# Altium footprint library FTP.PcbLib: 207 footprints (part 11 of 13)
Each footprint in its own frame and in the unit in brackets; x right, y up, seen from the top. Pads: shape width x height; smd on the part's side, far side on the other; paste and mask are expansions set on the pad; w line width, h text height; cw(c..) or ccw(c..) is an arc to the next point about the centre after c.
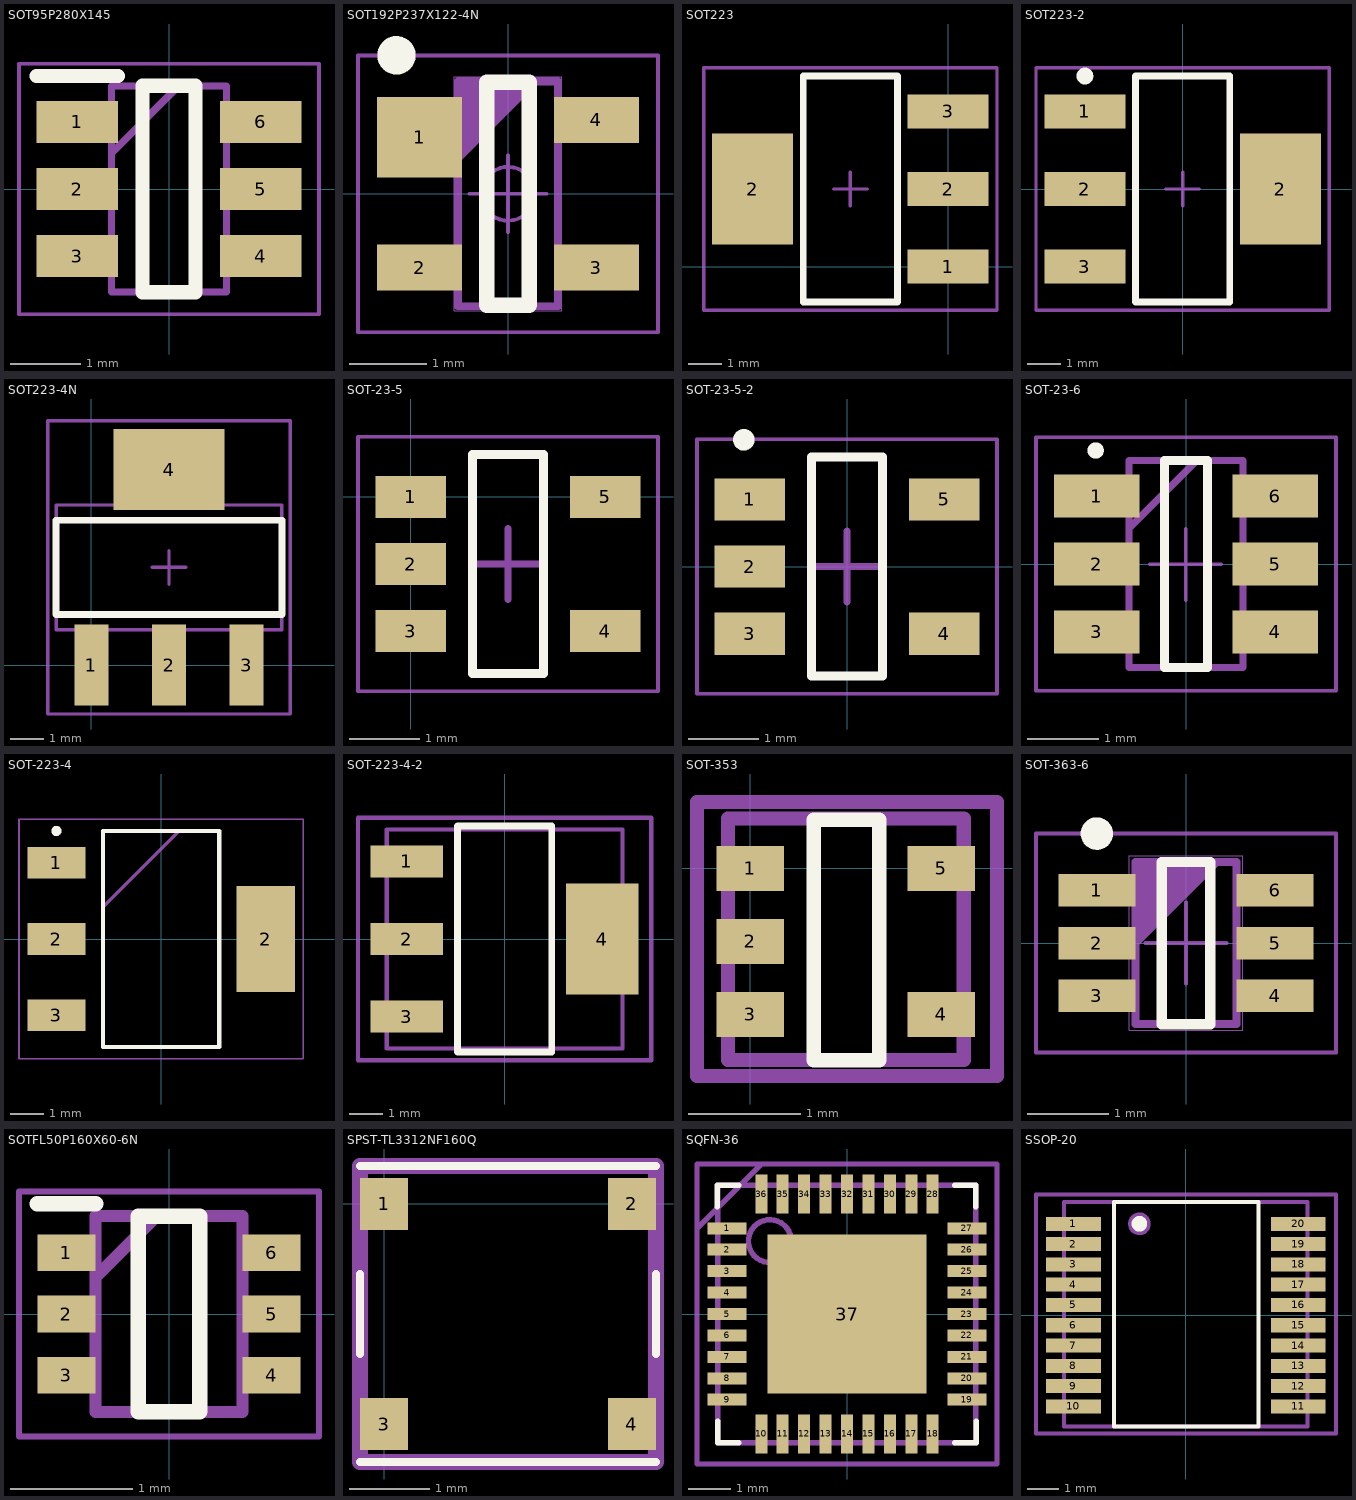
[diagram p10: the footprints below, top view; thin cyan lines are the x and y axes]

## SOT95P280X145 [mm]
pads (6):
  rect 1.15x0.6 smd: 1(-1.3,0.95) 2(-1.3,0) 3(-1.3,-0.95) 4(1.3,-0.95) 5(1.3,0) 6(1.3,0.95)
Top Overlay:
  lines w0.2: -1.875,1.6 -0.725,1.6 ; -0.375,-1.462 -0.375,1.462 0.375,1.462 0.375,-1.462 -0.375,-1.462
Mechanical 15:
  lines w0.1: -0.812,0.512 0.138,1.462 ; -0.812,-1.462 -0.812,1.462 0.812,1.462 0.812,-1.462 -0.812,-1.462
Mechanical 20:
  lines w0.05: -2.125,-1.775 -2.125,1.775 2.125,1.775 2.125,-1.775 -2.125,-1.775
3D body "USBLC6-2SC6.stp": height 1.45, standoff 0, extent -1.4,-1.462 1.4,1.463

## SOT192P237X122-4N [mm]
pads (4):
  rect 1.1x1.05 smd: 1(-1.15,0.735)
  rect 1.1x0.6 smd: 2(-1.15,-0.96) 3(1.15,-0.96) 4(1.15,0.96)
Top Overlay:
  circle w0.25: c-1.45,1.8 r0.125
  lines w0.2: -0.275,-1.45 -0.275,1.45 0.275,1.45 0.275,-1.45 -0.275,-1.45
Mechanical 13:
  lines w0.1: -0.65,0.46 0.35,1.46 ; -0.65,0.56 0.25,1.46 ; -0.65,0.66 0.15,1.46 ; -0.65,0.76 0.05,1.46 ; -0.65,0.86 -0.05,1.46 ; -0.65,0.96 -0.15,1.46 ; -0.65,1.06 -0.25,1.46 ; -0.65,1.16 -0.35,1.46 ; -0.65,1.26 -0.45,1.46 ; -0.65,1.36 -0.55,1.46 ; -0.65,-1.46 -0.65,1.46 0.65,1.46 0.65,-1.46 -0.65,-1.46
Mechanical 15:
  circle w0.05: c0,0 r0.35
  lines w0.001: -0.7,-1.52 -0.7,1.52 0.7,1.52 0.7,-1.52 -0.7,-1.52
  lines w0.05: -0.5,0 0.5,0 ; 0,-0.5 0,0.5 ; -1.95,-1.8 -1.95,1.8 1.95,1.8 1.95,-1.8 -1.95,-1.8
3D body "User Library-SOT143-1.STEP": height 1.22, standoff 0, extent -1.181,-1.45 1.182,1.45

## SOT223 [mm]
pads (4):
  rect 2.4x1 smd: 1(0,0) 2(0,2.3) 3(0,4.6)
  rect 2.4x3.3 smd: 2(-5.8,2.3)
Top Overlay:
  lines w0.2: -4.3,-1.05 -4.3,5.65 -1.5,5.65 -1.5,-1.05 -4.3,-1.05
Mechanical 15:
  lines w0.1: -3.4,2.3 -2.4,2.3 ; -2.9,1.8 -2.9,2.8 ; -7.25,-1.3 -7.25,5.9 1.45,5.9 1.45,-1.3 -7.25,-1.3
3D body "STN715.STEP": height 1.86, standoff 0, extent -6.527,-0.898 0.473,5.602

## SOT223-2 [mm]
pads (4):
  rect 2.4x1 smd: 1(-2.9,2.3) 2(-2.9,0) 3(-2.9,-2.3)
  rect 2.4x3.3 smd: 2(2.9,0)
Top Overlay:
  circle w0.25: c-2.9,3.35 r0.125
  lines w0.2: -1.4,-3.35 -1.4,3.35 1.4,3.35 1.4,-3.35 -1.4,-3.35
Mechanical 15:
  lines w0.1: -0.5,0 0.5,0 ; 0,-0.5 0,0.5 ; -4.35,-3.6 -4.35,3.6 4.35,3.6 4.35,-3.6 -4.35,-3.6
3D body "STN715.STEP": height 1.86, standoff 0, extent -3.373,-3.302 3.627,3.198

## SOT223-4N [mm] "SOT223, 4-Leads, Body 6.5x3.5mm, Pitch 2.3mm, Lead Span 7mm, IPC Medium Density"
height 1.8
pads (4):
  rect 1x2.4 smd: 1(0,0) 2(2.3,0) 3(4.6,0)
  rect 3.3x2.4 smd: 4(2.3,5.8)
Top Overlay:
  lines w0.2: -1.05,1.5 -1.05,4.3 5.65,4.3 5.65,1.5 -1.05,1.5
Mechanical 13:
  lines w0.1: -1.05,1.05 -1.05,4.75 5.65,4.75 5.65,1.05 -1.05,1.05
Mechanical 15:
  lines w0.1: 1.8,2.9 2.8,2.9 ; 2.3,2.4 2.3,3.4 ; -1.3,-1.45 -1.3,7.25 5.9,7.25 5.9,-1.45 -1.3,-1.45
3D body: height 1.8, standoff 0, extent -1.05,1.05 5.65,4.75

## SOT-23-5 [mm] "SOT23, 6-Leads, Body 2,90x2,80mm, Pitch 0,95mm, IPC Medium Density"
height 1
pads (5):
  rect 1x0.6 smd: 1(0,0) 2(0,-0.95) 3(0,-1.9) 4(2.75,-1.9) 5(2.75,0)
Top Overlay:
  lines w0.127: 0.875,-2.5 0.875,0.6 1.875,0.6 1.875,-2.5 0.875,-2.5
Mechanical 15:
  lines w0.05: -0.75,-2.75 3.5,-2.75 3.5,0.85 -0.75,0.85 -0.75,-2.75
  lines w0.1: 0.875,-0.95 1.875,-0.95 ; 1.375,-1.45 1.375,-0.45
3D body "SOT-23-5.STEP": height 1.46, standoff 0, extent -0.125,-2.45 2.875,0.55

## SOT-23-5-2 [mm] "SOT23, 6-Leads, Body 2,90x2,80mm, Pitch 0,95mm, IPC Medium Density"
height 1
pads (5):
  rect 1x0.6 smd: 1(-1.375,0.95) 2(-1.375,0) 3(-1.375,-0.95) 4(1.375,-0.95) 5(1.375,0.95)
Top Overlay:
  circle w0.152: c-1.461,1.796 r0.076
  lines w0.127: -0.5,-1.55 -0.5,1.55 0.5,1.55 0.5,-1.55 -0.5,-1.55
Mechanical 15:
  lines w0.05: -2.125,-1.8 2.125,-1.8 2.125,1.8 -2.125,1.8 -2.125,-1.8
  lines w0.1: -0.5,0 0.5,0 ; 0,-0.5 0,0.5
3D body "SOT-23-5.STEP": height 1.46, standoff 0, extent -1.5,-1.5 1.5,1.5

## SOT-23-6 [mm]
pads (6):
  rect 1.2x0.6 smd: 1(-1.25,0.95) 2(-1.25,0) 3(-1.25,-0.95) 4(1.25,-0.95) 5(1.25,0) 6(1.25,0.95)
Top Overlay:
  circle w0.127: c-1.265,1.589 r0.05
  lines w0.127: -0.3,-1.45 -0.3,1.45 0.3,1.45 0.3,-1.45 -0.3,-1.45
Mechanical 13:
  lines w0.1: -0.8,0.5 0.15,1.45 ; -0.8,-1.45 -0.8,1.45 0.8,1.45 0.8,-1.45 -0.8,-1.45
Mechanical 15:
  lines w0.05: -0.504,-0.006 0.496,-0.006 ; -0.004,-0.506 -0.004,0.494 ; -2.1,-1.775 -2.1,1.775 2.1,1.775 2.1,-1.775 -2.1,-1.775
3D body "SN74LVC1G3157DBVR.stp": height 1.45, standoff 0, extent -1.4,-1.45 1.4,1.45

## SOT-223-4 [mm]
pads (4):
  rect 1.75x0.95 smd: 1(-3.15,2.3) 2(-3.15,0) 3(-3.15,-2.3)
  rect 1.75x3.2 smd: 2(3.15,0)
Top Overlay:
  circle w0.152: c-3.15,3.25 r0.076
  lines w0.127: -1.75,-3.25 -1.75,3.25 1.75,3.25 1.75,-3.25 -1.75,-3.25
Mechanical 13:
  lines w0.1: -1.75,0.95 0.55,3.25 ; -1.75,-3.25 -1.75,3.25 1.75,3.25 1.75,-3.25 -1.75,-3.25
Mechanical 15:
  lines w0.05: -4.275,-3.6 -4.275,3.6 4.275,3.6 4.275,-3.6 -4.275,-3.6
3D body "LM317MQDCYR.stp": height 1.8, standoff 0, extent -3.5,-3.25 3.5,3.25

## SOT-223-4-2 [mm]
pads (4):
  rect 2.15x0.95 smd paste+0 mask+0.07: 1(-2.9,2.3) 2(-2.9,0) 3(-2.9,-2.3)
  rect 2.15x3.3 smd paste+0 mask+0.07: 4(2.9,0)
Top Overlay:
  lines w0.2: -1.4,-3.35 -1.4,3.35 1.4,3.35 1.4,-3.35 -1.4,-3.35
  text "." at -5.722,2.286 h0.76
Mechanical 13:
  lines w0.127: -3.5,-3.25 3.5,-3.25 3.5,3.25 -3.5,3.25 -3.5,-3.25
Mechanical 15:
  lines w0.127: -4.35,-3.6 -4.35,3.6 4.35,3.6 4.35,-3.6 -4.35,-3.6
  text "+" at 0.759,-0.515 h1.5
3D body "TLV1117LV33DCYR.stp": height 1.8, standoff 0, extent -3.5,-3.25 3.5,3.25

## SOT-353 [mm] "SOT23, 6-Leads, Body 2,90x2,80mm, Pitch 0,95mm, IPC Medium Density"
height 1
pads (5):
  rect 0.6x0.4 smd mask+0.07: 1(0,0) 2(0,-0.65) 3(0,-1.3) 4(1.7,-1.3) 5(1.7,0)
Top Overlay:
  lines w0.127: 0.563,-1.708 0.563,0.434 1.146,0.434 1.146,-1.708 0.563,-1.708
Mechanical 13:
  lines w0.127: -0.2,-1.706 -0.2,0.444 1.9,0.444 1.9,-1.706 -0.2,-1.706
Mechanical 15:
  lines w0.127: -0.476,-1.849 2.195,-1.849 2.195,0.591 -0.476,0.591 -0.476,-1.849
3D body "SOT353.stp": height 1.02, standoff -0.03, extent -0.2,-1.706 1.9,0.444

## SOT-363-6 [mm]
pads (6):
  rect 0.95x0.4 smd mask+0.07: 1(-1.1,0.65) 2(-1.1,0) 3(-1.1,-0.65) 4(1.1,-0.65) 5(1.1,0) 6(1.1,0.65)
Top Overlay:
  circle w0.2: c-1.1,1.35 r0.1
  lines w0.127: -0.3,-1 0.3,-1 0.3,1 -0.3,1 -0.3,-1
Mechanical 13:
  lines w0.1: -0.625,0 0.375,1 ; -0.625,0.1 0.275,1 ; -0.625,0.2 0.175,1 ; -0.625,0.3 0.075,1 ; -0.625,0.4 -0.025,1 ; -0.625,0.5 -0.125,1 ; -0.625,0.6 -0.225,1 ; -0.625,0.7 -0.325,1 ; -0.625,0.8 -0.425,1 ; -0.625,0.9 -0.525,1 ; -0.625,-1 0.625,-1 0.625,1 -0.625,1 -0.625,-1
Mechanical 15:
  lines w0.001: -0.7,-1.075 0.7,-1.075 0.7,1.075 -0.7,1.075 -0.7,-1.075
  lines w0.05: -0.5,0 0.5,0 ; 0,-0.5 0,0.5 ; -1.85,-1.35 1.85,-1.35 1.85,1.35 -1.85,1.35 -1.85,-1.35
3D body "MBT3906DW1T1G.stp": height 1.1, standoff 0, extent -1.05,-1 1.05,1

## SOTFL50P160X60-6N [mm]
pads (6):
  rect 0.475x0.3 smd: 1(-0.838,0.5) 2(-0.838,0) 3(-0.838,-0.5) 4(0.838,-0.5) 5(0.838,0) 6(0.838,0.5)
Top Overlay:
  lines w0.127: -1.075,0.9 -0.6,0.9 ; -0.25,-0.8 0.25,-0.8 0.25,0.8 -0.25,0.8 -0.25,-0.8
Mechanical 13:
  lines w0.1: -0.6,0.3 -0.1,0.8 ; -0.6,-0.8 0.6,-0.8 0.6,0.8 -0.6,0.8 -0.6,-0.8
Mechanical 15:
  lines w0.05: -1.225,-1 1.225,-1 1.225,1 -1.225,1 -1.225,-1
3D body "USBLC6-2P6.stp": height 0.6, standoff 0, extent -0.8,-0.8 0.8,0.8

## SPST-TL3312NF160Q [mm]
pads (4):
  rect 0.6x0.65 smd: 1(0,0) 2(3.1,0) 3(0,-2.75) 4(3.1,-2.75)
Top Overlay:
  lines w0.1: -0.3,-3.225 3.4,-3.225 ; -0.3,-1.875 -0.3,-0.875 ; -0.3,0.475 3.4,0.475 ; 3.4,-1.875 3.4,-0.875
Mechanical 15:
  lines w0.2: -0.3,-3.225 3.4,-3.225 3.4,0.475 -0.3,0.475 -0.3,-3.225
3D body "Part4.STEP": height 0.81, standoff 0, extent -0.326,-3.247 3.374,0.453

## SQFN-36 [mm]
pads (37):
  rect 0.9x0.28 smd: 1(-2.8,2) 2(-2.8,1.5) 3(-2.8,1) 4(-2.8,0.5) 5(-2.8,0) 6(-2.8,-0.5) 7(-2.8,-1) 8(-2.8,-1.5) 9(-2.8,-2) 19(2.8,-2) 20(2.8,-1.5) 21(2.8,-1) 22(2.8,-0.5) 23(2.8,0) 24(2.8,0.5) 25(2.8,1) 26(2.8,1.5) 27(2.8,2)
  rect 0.28x0.9 smd: 10(-2,-2.8) 11(-1.5,-2.8) 12(-1,-2.8) 13(-0.5,-2.8) 14(0,-2.8) 15(0.5,-2.8) 16(1,-2.8) 17(1.5,-2.8) 18(2,-2.8) 28(2,2.8) 29(1.5,2.8) 30(1,2.8) 31(0.5,2.8) 32(0,2.8) 33(-0.5,2.8) 34(-1,2.8) 35(-1.5,2.8) 36(-2,2.8)
  rrect0% 3.7x3.7 smd: 37(0,0)
Top Overlay:
  lines w0.127: -3.026,2.507 -3.026,3.005 -2.528,3.005 ; -3.018,-2.502 -3.018,-3 -2.52,-3 ; 2.51,2.999 3.008,2.999 3.008,2.501 ; 2.513,-3.001 3.011,-3.001 3.011,-2.503
  text "." at -4.2,2 h0.76
Mechanical 13:
  circle w0.127: c-1.8,1.7 r0.5
  lines w0.127: -3.018,-3 3.008,-3 3.008,2.999 -3.018,2.999 -3.018,-3
Mechanical 15:
  lines w0.127: -3.5,2 -2,3.5 ; -3.5,-3.5 -3.5,3.5 3.5,3.5 3.5,-3.5 -3.5,-3.5
  text "+" at -0.495,-0.751 h1.5
3D body "USB2514B_M2.stp": height 1, standoff 0, extent -3.05,-3.05 3.05,3.05

## SSOP-20 [mm]
pads (20):
  rect 1.75x0.45 smd mask+0.07: 1(-3.6,2.925) 2(-3.6,2.275) 3(-3.6,1.625) 4(-3.6,0.975) 5(-3.6,0.325) 6(-3.6,-0.325) 7(-3.6,-0.975) 8(-3.6,-1.625) 9(-3.6,-2.275) 10(-3.6,-2.925) 11(3.6,-2.925) 12(3.6,-2.275) 13(3.6,-1.625) 14(3.6,-0.975) 15(3.6,-0.325) 16(3.6,0.325) 17(3.6,0.975) 18(3.6,1.625) 19(3.6,2.275) 20(3.6,2.925)
Top Overlay:
  circle w0.3: c-1.487,2.925 r0.1
  lines w0.127: -2.3,-3.575 -2.3,3.625 2.328,3.625 2.328,-3.575 -2.3,-3.575
  text "." at -5.7,2.9 h0.76
Mechanical 13:
  circle w0.127: c-1.487,2.925 r0.3
  lines w0.127: -3.9,-3.575 3.9,-3.575 3.9,3.625 -3.9,3.625 -3.9,-3.575
Mechanical 15:
  lines w0.127: -4.8,-3.8 4.813,-3.8 4.813,3.87 -4.8,3.87 -4.8,-3.8
  text "+" at -0.489,-0.75 h1.5
3D body "PIC18F14K22-I_SS.stp": height 2, standoff 0, extent -3.876,-3.601 3.924,3.599